# Altium schematic symbol library EEHZU1H151V.SchLib: 1 symbol
Pins are listed as number, name and electrical type; pins without a type are passive.

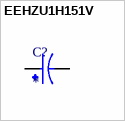
[diagram p0: symbol EEHZU1H151V]

## EEHZU1H151V
designator C?
CAP POLYMER HYBRID 150UF 50V SMD; MP: EEH-ZU1H151V; MF: Panasonic Electronic Components; Package: RADIAL-2 Panasonic; Purchase-URL: https://pricing.snapeda.com/search/part/EEH-ZU1H151V/?ref=eda; Price: None; Availability: In Stock; Check_prices: https://www.snapeda.com/parts/EEH-ZU1H151V/Panasonic/view-part/?ref=eda; Value: *; SnapEDA_Link: https://www.snapeda.com/parts/EEH-ZU1H151V/Panasonic/view-part/?ref=snap
footprint CAP_EEHZU1H151V
pins: 1, 2